# Altium schematic symbol library 615008160021.SchLib: 1 symbol
Pins are listed as number, name and electrical type; pins without a type are passive.

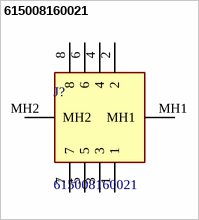
[diagram p0: symbol 615008160021]

## 615008160021
designator J?
WR-MJ_8P8C_THT_Horizontal ModularJacks_8P8C_THT_Horizontal_Plastic_Tab Up_ Cat6; Manufacturer_Name: Wurth Elektronik; Geometry.Height: 14.63mm; Mouser Part Number: 710-615008160021; Mouser Price/Stock: https://www.mouser.co.uk/ProductDetail/Wurth-Elektronik/615008160021?qs=OlC7AqGiEDnv55QyQjNbug%3D%3D; Manufacturer_Part_Number: 615008160021; Datasheet Link: https://www.we-online.com/catalog/datasheet/615008160021.pdf
footprint 615008160021
pins: 1, 2, 3, 4, 5, 6, 7, 8, MH1, MH2